# Altium schematic symbol library Ic%.SchLib: 452 symbols (part 7 of 12)
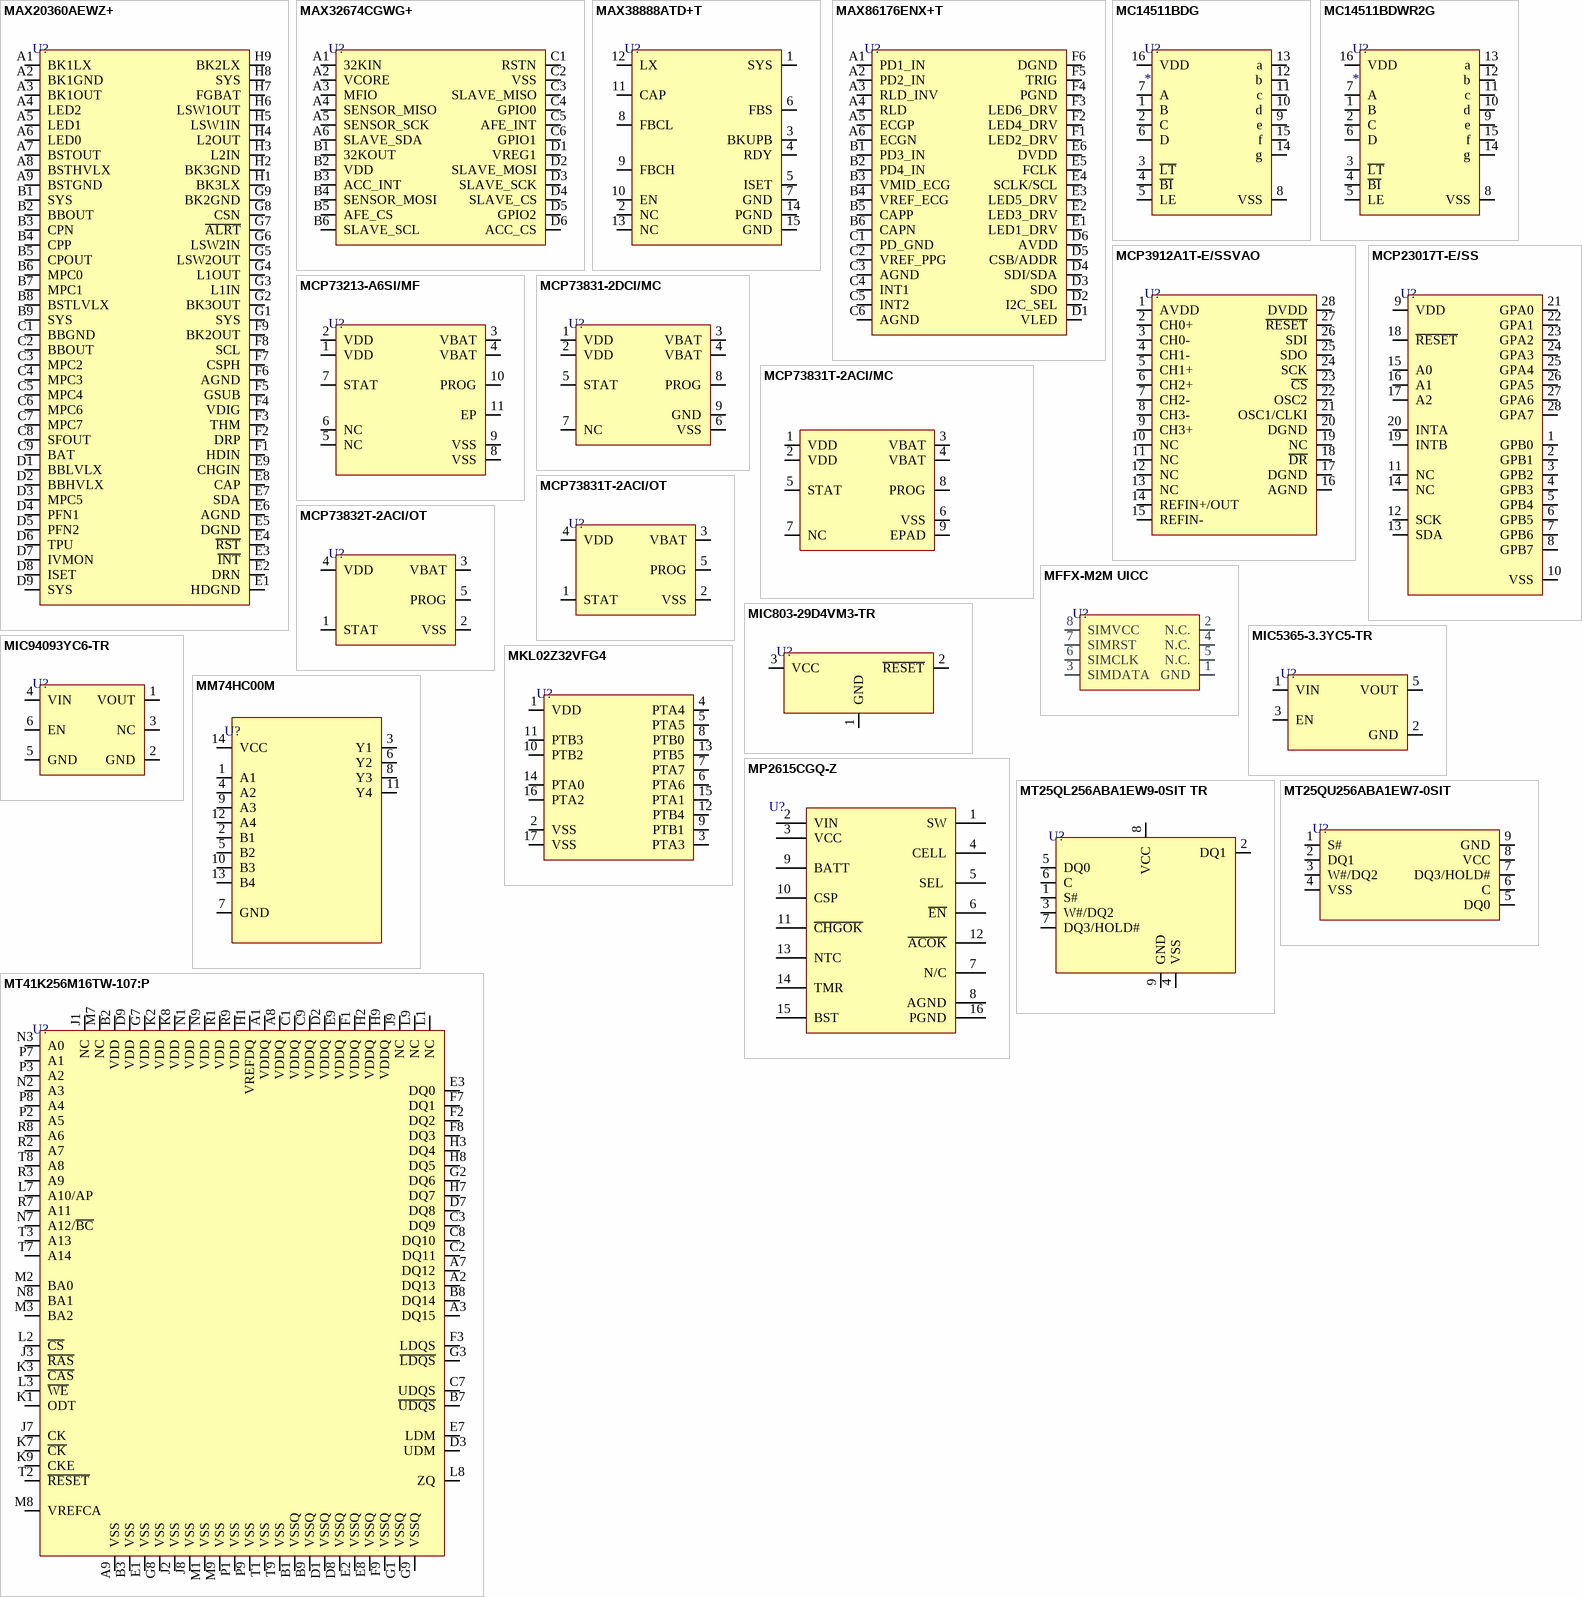
[diagram p29: symbols MAX20360AEWZ+ to MT41K256M16TW-107:P]

## MT25QU256ABA1EW7-0SIT
designator U?
IC FLASH 256MBIT SPI 8WPDFN; Manufacturer: Micron Technology; Manufacturer Part Number: MT25QU256ABA1EW7-0SIT; Supplier: Avnet; Supplier Part Number: 80AH7560; RoHS: Yes; Category: Flash; Stock: 1935; Pricing: 1=5.95, 10=5.43, 25=5.32, 50=5.28, 100=4.74 (USD); ComponentLink1URL: https://www.micron.com/~/media/documents/products/data-sheet/nor-flash/serial-nor/mt25q/die-rev-a/mt25q_qljs_u_256_aba_0.pdf?src-supplier=Digi-Key; ComponentLink1Description: https://www.micron.com/~/media/documents/products/data-sheet/nor-flash/serial-nor/mt25q/die-rev-a/mt25q_qljs_u_256_aba_0.pdf?src-supplier=Digi-Key; ComponentLink2URL: http://www.micron.com/-/media/documents/products/data%20sheet/nor%20flash/serial%20nor/mt25q/qlks_512mb_3v_45nm.pdf?src-supplier=Avnet; ComponentLink2Description: http://www.micron.com/-/media/documents/products/data%20sheet/nor%20flash/serial%20nor/mt25q/qlks_512mb_3v_45nm.pdf?src-supplier=Avnet; ComponentLink3URL: https://datasheet.octopart.com/MT25QU256ABA1EW7-0SIT-Micron-datasheet-149529383.pdf?src-supplier=SHENGYU+ELECTRONICS; ComponentLink3Description: https://datasheet.octopart.com/MT25QU256ABA1EW7-0SIT-Micron-datasheet-149529383.pdf?src-supplier=SHENGYU+ELECTRONICS; ComponentLink4URL: https://datasheet.octopart.com/MT25QU256ABA1EW7-0SIT-Micron-datasheet-138104096.pdf?src-supplier=LKR; ComponentLink4Description: https://datasheet.octopart.com/MT25QU256ABA1EW7-0SIT-Micron-datasheet-138104096.pdf?src-supplier=LKR; Item Type: IC
footprint 8-WPDFN (6x5)(MLP8)
pins: 1 S#, 2 DQ1, 3 W#/DQ2, 4 VSS, 5 DQ0, 6 C, 7 DQ3/HOLD#, 8 VCC, 9 GND

## MT41K256M16TW-107:P
designator U?
IC DRAM 4GBIT PAR 96FBGA; Manufacturer: Micron Technology; Manufacturer Part Number: MT41K256M16TW-107:P; Memory Format: Volatile,RAM,SDRAM; Frequency: 933MHz; Access Time: 20ns; Memory Size: 4Gb; Interface: Parallel; Address Bus Width: 15b; Operating Supply Voltage: 1.35V; Organization: 256M x 16; Supplier: Avnet; Supplier Part Number: MT41K256M16TW-107:P; RoHS: Yes; Category: RAM; Stock: 16187; Pricing: 1=4.93, 10=4.794, 30=4.658, 50=4.556, 100=4.42, 250=4.284, 500=4.148 (USD); Mounting Technology: Surface Mount; Case/Package: TFBGA; Pins: 96; Min Operating Temperature: 0°C; Max Operating Temperature: 95°C; Density: 4Gb; Clock Frequency: 933MHz; Series: -; Access Time-Max: 20ns; RoHS Compliant: Yes; ComponentLink1URL: http://www.farnell.com/datasheets/2712419.pdf?src-supplier=Farnell; ComponentLink1Description: http://www.farnell.com/datasheets/2712419.pdf?src-supplier=Farnell; ComponentLink2URL: https://www.micron.com/~/media/documents/products/data-sheet/dram/ddr3/4gb_ddr3l.pdf?src-supplier=Digi-Key; ComponentLink2Description: https://www.micron.com/~/media/documents/products/data-sheet/dram/ddr3/4gb_ddr3l.pdf?src-supplier=Digi-Key; ComponentLink3URL: https://www.micron.com/~/media/documents/products/data-sheet/dram/ddr3/4gb_ddr3l.pdf?src-supplier=Avnet; ComponentLink3Description: https://www.micron.com/~/media/documents/products/data-sheet/dram/ddr3/4gb_ddr3l.pdf?src-supplier=Avnet; ComponentLink4URL: http://www.farnell.com/datasheets/2712419.pdf?src-supplier=Newark; ComponentLink4Description: http://www.farnell.com/datasheets/2712419.pdf?src-supplier=Newark; LCSC Part Number: C253882; Item Type: IC
footprint 96-FBGA (8x14)
pins: A1 VDDQ, A2 DQ13, A3 DQ15, A7 DQ12, A8 VDDQ, A9 VSS, B1 VSSQ, B2 VDD, B3 VSS, B7 ~{UDQS}, B8 DQ14, B9 VSSQ, C1 VDDQ, C2 DQ11, C3 DQ9, C7 UDQS, C8 DQ10, C9 VDDQ, D1 VSSQ, D2 VDDQ, D3 UDM, D7 DQ8, D8 VSSQ, D9 VDD, E1 VSS, E2 VSSQ, E3 DQ0, E7 LDM, E8 VSSQ, E9 VDDQ, F1 VDDQ, F2 DQ2, F3 LDQS, F7 DQ1, F8 DQ3, F9 VSSQ, G1 VSSQ, G2 DQ6, G3 ~{LDQS}, G7 VDD, G8 VSS, G9 VSSQ, H1 VREFDQ, H2 VDDQ, H3 DQ4, H7 DQ7, H8 DQ5, H9 VDDQ, J1 NC, J2 VSS, J3 ~{RAS}, J7 CK, J8 VSS, J9 NC, K1 ODT, K2 VDD, K3 ~{CAS}, K7 ~{CK}, K8 VDD, K9 CKE, L1 NC, L2 ~{CS}, L3 ~{WE}, L7 A10/AP, L8 ZQ, L9 NC, M1 VSS, M2 BA0, M3 BA2, M7 NC, M8 VREFCA, M9 VSS, N1 VDD, N2 A3, N3 A0, N7 A12/~{BC}, N8 BA1, N9 VDD, P1 VSS, P2 A5, P3 A2, P7 A1, P8 A4, P9 VSS, R1 VDD, R2 A7, R3 A9, R7 A11, R8 A6, R9 VDD, T1 VSS, T2 ~{RESET}, T3 A13, T7 A14, T8 A8, T9 VSS

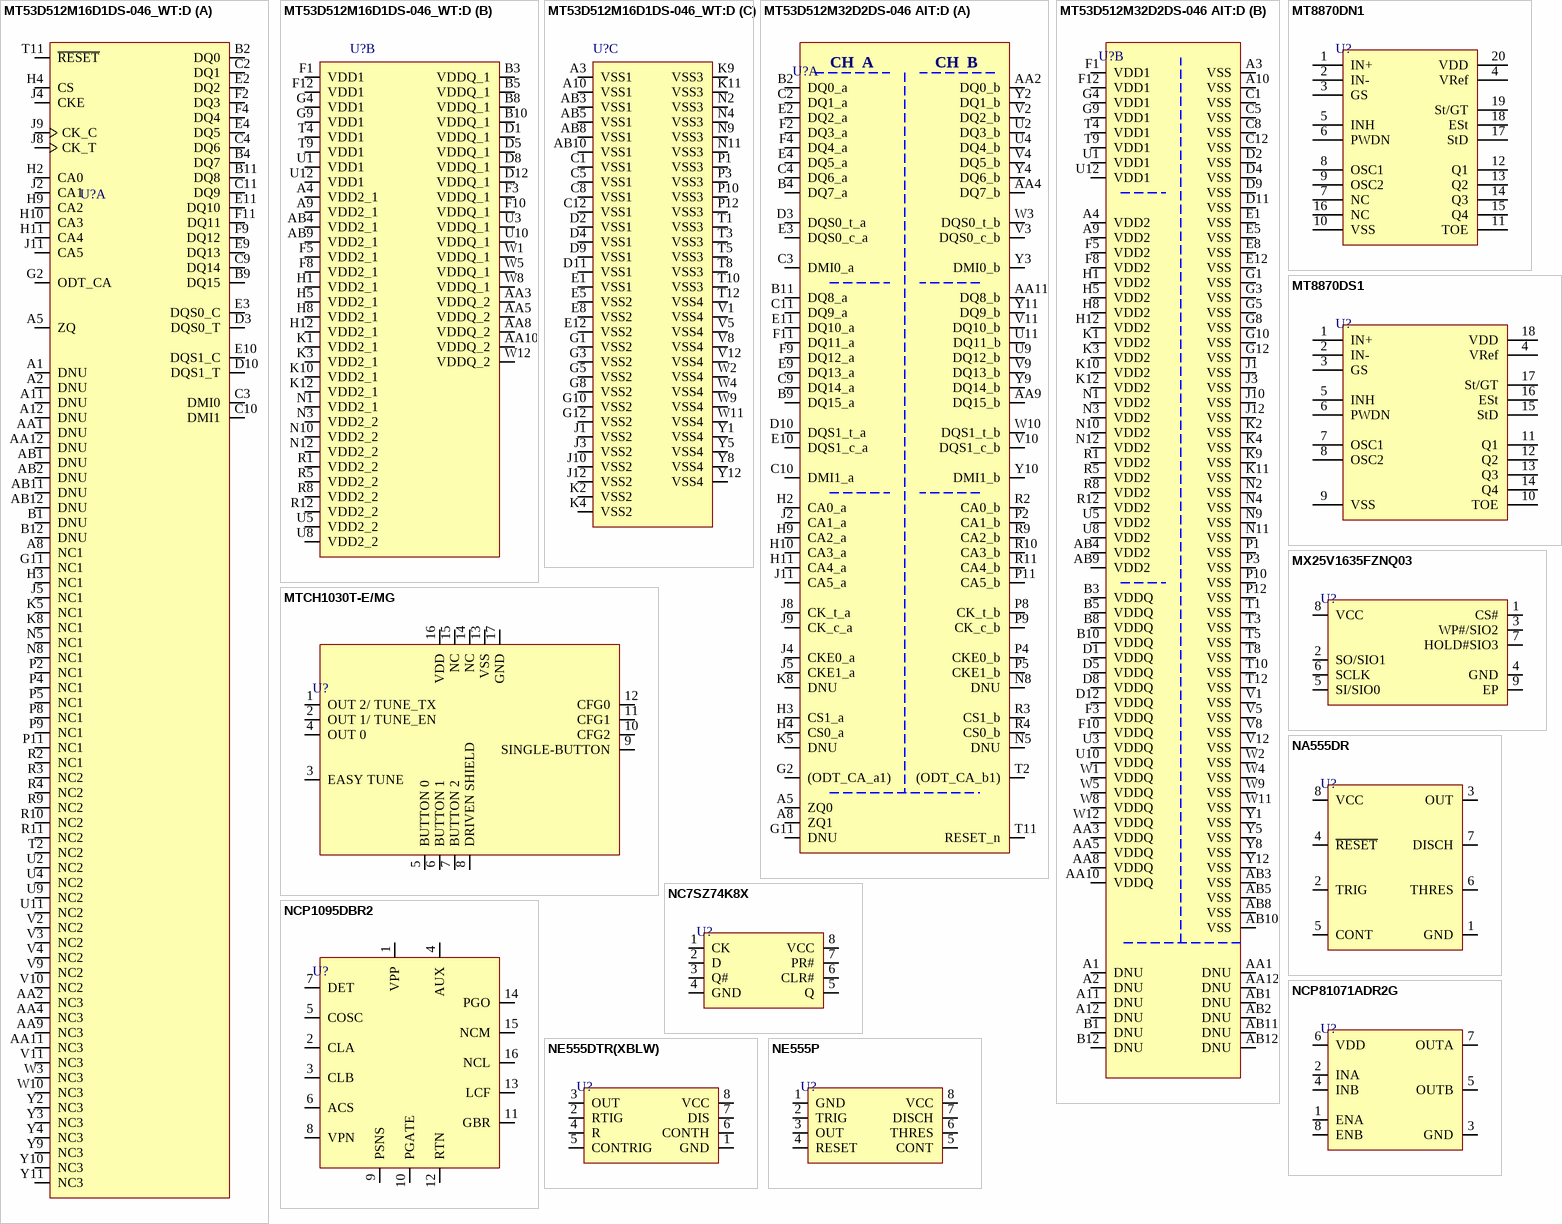
[diagram p12: symbols MT53D512M16D1DS-046_WT:D to NE555P]

## MT53D512M16D1DS-046_WT:D
designator U?
IC Dram 8GBIT 2.133GHZ 200WFBGA; Manufacturer: Micron Technology; Manufacturer Part Number: MT53D512M16D1DS-046 WT:D; Supplier: Avnet; Supplier Part Number: 80AH8240; RoHS: No; Category: Memory; Stock: 500; Pricing: 1=10.94, 10=10.13, 25=9.9, 50=9.85, 100=8.67 (USD); ComponentLink1URL: https://datasheet.octopart.com/MT53D512M16D1DS-046-WT%3AD-Micron-datasheet-165827613.pdf?src-supplier=Farnell; ComponentLink1Description: https://datasheet.octopart.com/MT53D512M16D1DS-046-WT%3AD-Micron-datasheet-165827613.pdf?src-supplier=Farnell; Item Type: IC
footprint 200-WFBGA (10x14.5)
part A pins: A1 DNU, A2 DNU, A5 ZQ, A8 NC1, A11 DNU, A12 DNU, AA1 DNU, AA2 NC3, AA4 NC3, AA9 NC3, AA11 NC3, AA12 DNU, AB1 DNU, AB2 DNU, AB11 DNU, AB12 DNU, B1 DNU, B2 DQ0, B4 DQ7, B9 DQ15, B11 DQ8, B12 DNU, C2 DQ1, C3 DMI0, C4 DQ6, C9 DQ14, C10 DMI1, C11 DQ9, D3 DQS0_T, D10 DQS1_T, E2 DQ2, E3 DQS0_C, E4 DQ5, E9 DQ13, E10 DQS1_C, E11 DQ10, F2 DQ3, F4 DQ4, F9 DQ12, F11 DQ11, G2 ODT_CA, G11 NC1, H2 CA0, H3 NC1, H4 CS, H9 CA2, H10 CA3, H11 CA4, J2 CA1, J4 CKE, J5 NC1, J8 CK_T, J9 CK_C, J11 CA5, K5 NC1, K8 NC1, N5 NC1, N8 NC1, P2 NC1, P4 NC1, P5 NC1, P8 NC1, P9 NC1, P11 NC1, R2 NC1, R3 NC2, R4 NC2, R9 NC2, R10 NC2, R11 NC2, T2 NC2, T11 ~{RESET}, U2 NC2, U4 NC2, U9 NC2, U11 NC2, V2 NC2, V3 NC2, V4 NC2, V9 NC2, V10 NC2, V11 NC3, W3 NC3, W10 NC3, Y2 NC3, Y3 NC3, Y4 NC3, Y9 NC3, Y10 NC3, Y11 NC3
part B pins: A4 VDD2_1 (power), A9 VDD2_1 (power), AA3 VDDQ_2 (power), AA5 VDDQ_2 (power), AA8 VDDQ_2 (power), AA10 VDDQ_2 (power), AB4 VDD2_1 (power), AB9 VDD2_1 (power), B3 VDDQ_1 (power), B5 VDDQ_1 (power), B8 VDDQ_1 (power), B10 VDDQ_1 (power), D1 VDDQ_1 (power), D5 VDDQ_1 (power), D8 VDDQ_1 (power), D12 VDDQ_1 (power), F1 VDD1 (power), F3 VDDQ_1 (power), F5 VDD2_1 (power), F8 VDD2_1 (power), F10 VDDQ_1 (power), F12 VDD1 (power), G4 VDD1 (power), G9 VDD1 (power), H1 VDD2_1 (power), H5 VDD2_1 (power), H8 VDD2_1 (power), H12 VDD2_1 (power), K1 VDD2_1 (power), K3 VDD2_1 (power), K10 VDD2_1 (power), K12 VDD2_1 (power), N1 VDD2_1 (power), N3 VDD2_2 (power), N10 VDD2_2 (power), N12 VDD2_2 (power), R1 VDD2_2 (power), R5 VDD2_2 (power), R8 VDD2_2 (power), R12 VDD2_2 (power), T4 VDD1 (power), T9 VDD1 (power), U1 VDD1 (power), U3 VDDQ_1 (power), U5 VDD2_2 (power), U8 VDD2_2 (power), U10 VDDQ_1 (power), U12 VDD1 (power), W1 VDDQ_1 (power), W5 VDDQ_1 (power), W8 VDDQ_1 (power), W12 VDDQ_2 (power)
part C pins: A3 VSS1 (power), A10 VSS1 (power), AB3 VSS1 (power), AB5 VSS1 (power), AB8 VSS1 (power), AB10 VSS1 (power), C1 VSS1 (power), C5 VSS1 (power), C8 VSS1 (power), C12 VSS1 (power), D2 VSS1 (power), D4 VSS1 (power), D9 VSS1 (power), D11 VSS1 (power), E1 VSS1 (power), E5 VSS2 (power), E8 VSS2 (power), E12 VSS2 (power), G1 VSS2 (power), G3 VSS2 (power), G5 VSS2 (power), G8 VSS2 (power), G10 VSS2 (power), G12 VSS2 (power), J1 VSS2 (power), J3 VSS2 (power), J10 VSS2 (power), J12 VSS2 (power), K2 VSS2 (power), K4 VSS2 (power), K9 VSS3 (power), K11 VSS3 (power), N2 VSS3 (power), N4 VSS3 (power), N9 VSS3 (power), N11 VSS3 (power), P1 VSS3 (power), P3 VSS3 (power), P10 VSS3 (power), P12 VSS3 (power), T1 VSS3 (power), T3 VSS3 (power), T5 VSS3 (power), T8 VSS3 (power), T10 VSS3 (power), T12 VSS4 (power), V1 VSS4 (power), V5 VSS4 (power), V8 VSS4 (power), V12 VSS4 (power), W2 VSS4 (power), W4 VSS4 (power), W9 VSS4 (power), W11 VSS4 (power), Y1 VSS4 (power), Y5 VSS4 (power), Y8 VSS4 (power), Y12 VSS4 (power)

## MT53D512M32D2DS-046 AIT:D
designator U?
IC Dram 16GBIT 2133MHZ 200WFBGA; Manufacturer: Micron Technology; Manufacturer Part Number: MT53D512M32D2DS-046 AIT:D; Item Type: Memory IC; Memory Format: Volatile; Memory Size: 16Gb; Frequency: 2.133GHz; Supplier: Digikey; Supplier Part Number: MT53D512M32D2DS-046AIT:D-ND; RoHS: No; Stock: 428; Pricing: 1=20.55, 10=19.14, 25=18.9348, 40=18.46775, 80=16.212, 230=15.66509 (USD); Mounting Technology: Surface Mount; Pins: 200; Min Operating Temperature: -40°C; Max Operating Temperature: 85°C; Series: -; Packaging: Tray
footprint 200-WFBGA (10x14.5)
part A pins: A5 ZQ0, A8 ZQ1, AA2 DQ0_b, AA4 DQ7_b, AA9 DQ15_b, AA11 DQ8_b, B2 DQ0_a, B4 DQ7_a, B9 DQ15_a, B11 DQ8_a, C2 DQ1_a, C3 DMI0_a, C4 DQ6_a, C9 DQ14_a, C10 DMI1_a, C11 DQ9_a, D3 DQS0_t_a, D10 DQS1_t_a, E2 DQ2_a, E3 DQS0_c_a, E4 DQ5_a, E9 DQ13_a, E10 DQS1_c_a, E11 DQ10_a, F2 DQ3_a, F4 DQ4_a, F9 DQ12_a, F11 DQ11_a, G2 (ODT_CA_a1), G11 DNU, H2 CA0_a, H3 CS1_a, H4 CS0_a, H9 CA2_a, H10 CA3_a, H11 CA4_a, J2 CA1_a, J4 CKE0_a, J5 CKE1_a, J8 CK_t_a, J9 CK_c_a, J11 CA5_a, K5 DNU, K8 DNU, N5 DNU, N8 DNU, P2 CA1_b, P4 CKE0_b, P5 CKE1_b, P8 CK_t_b, P9 CK_c_b, P11 CA5_b, R2 CA0_b, R3 CS1_b, R4 CS0_b, R9 CA2_b, R10 CA3_b, R11 CA4_b, T2 (ODT_CA_b1), T11 RESET_n, U2 DQ3_b, U4 DQ4_b, U9 DQ12_b, U11 DQ11_b, V2 DQ2_b, V3 DQS0_c_b, V4 DQ5_b, V9 DQ13_b, V10 DQS1_c_b, V11 DQ10_b, W3 DQS0_t_b, W10 DQS1_t_b, Y2 DQ1_b, Y3 DMI0_b, Y4 DQ6_b, Y9 DQ14_b, Y10 DMI1_b, Y11 DQ9_b
part B pins: A1 DNU, A2 DNU, A3 VSS, A4 VDD2, A9 VDD2, A10 VSS, A11 DNU, A12 DNU, AA1 DNU, AA3 VDDQ, AA5 VDDQ, AA8 VDDQ, AA10 VDDQ, AA12 DNU, AB1 DNU, AB2 DNU, AB3 VSS, AB4 VDD2, AB5 VSS, AB8 VSS, AB9 VDD2, AB10 VSS, AB11 DNU, AB12 DNU, B1 DNU, B3 VDDQ, B5 VDDQ, B8 VDDQ, B10 VDDQ, B12 DNU, C1 VSS, C5 VSS, C8 VSS, C12 VSS, D1 VDDQ, D2 VSS, D4 VSS, D5 VDDQ, D8 VDDQ, D9 VSS, D11 VSS, D12 VDDQ, E1 VSS, E5 VSS, E8 VSS, E12 VSS, F1 VDD1, F3 VDDQ, F5 VDD2, F8 VDD2, F10 VDDQ, F12 VDD1, G1 VSS, G3 VSS, G4 VDD1, G5 VSS, G8 VSS, G9 VDD1, G10 VSS, G12 VSS, H1 VDD2, H5 VDD2, H8 VDD2, H12 VDD2, J1 VSS, J3 VSS, J10 VSS, J12 VSS, K1 VDD2, K2 VSS, K3 VDD2, K4 VSS, K9 VSS, K10 VDD2, K11 VSS, K12 VDD2, N1 VDD2, N2 VSS, N3 VDD2, N4 VSS, N9 VSS, N10 VDD2, N11 VSS, N12 VDD2, P1 VSS, P3 VSS, P10 VSS, P12 VSS, R1 VDD2, R5 VDD2, R8 VDD2, R12 VDD2, T1 VSS, T3 VSS, T4 VDD1, T5 VSS, T8 VSS, T9 VDD1, T10 VSS, T12 VSS, U1 VDD1, U3 VDDQ, U5 VDD2, U8 VDD2, U10 VDDQ, U12 VDD1, V1 VSS, V5 VSS, V8 VSS, V12 VSS, W1 VDDQ, W2 VSS, W4 VSS, W5 VDDQ, W8 VDDQ, W9 VSS, W11 VSS, W12 VDDQ, Y1 VSS, Y5 VSS, Y8 VSS, Y12 VSS
part A text: CH  A; CH  B

## MT8870DN1
designator U?
IC TELECOM INTERFACE 20SSOP; Manufacturer: Microsemi; Manufacturer Part Number: MT8870DN1; Logic Function: Receiver; Number of Circuits: 1; Operating Supply Current: 3mA; Frequency: 3.58MHz; Operating Supply Voltage: 5V; Min Supply Voltage: 4.75V; Max Supply Voltage: 5.25V; Max Power Dissipation: 500mW; Supplier 1: Newark; RoHS: No; Category: Uncategorized; Mounting Technology: Surface Mount; Case/Package: SSOP; Pins: 20; Weight: 0.016oz; Min Operating Temperature: -40°C; Max Operating Temperature: 85°C; Packaging: Rail/Tube; Package Quantity: 660; Radiation Hardening: No; RoHS Compliant: No; ComponentLink1URL: https://datasheet.ciiva.com/29641/mt8870d-datasheet-oct2006-29641321.pdf?src-supplier=Digi-Key; ComponentLink1Description: https://datasheet.ciiva.com/29641/mt8870d-datasheet-oct2006-29641321.pdf?src-supplier=Digi-Key; Supplier Part Number 1: 03AH2719; LCSC Part Number: C1522106; Item Type: IC
footprint SSOP-20-208mil
pins: 1 IN+, 2 IN-, 3 GS, 4 VRef, 5 INH, 6 PWDN, 7 NC, 8 OSC1, 9 OSC2, 10 VSS, 11 TOE, 12 Q1, 13 Q2, 14 Q3, 15 Q4, 16 NC, 17 StD, 18 ESt, 19 St/GT, 20 VDD

## MT8870DS1
designator U?
IC TELECOM INTERFACE 18SOIC; Manufacturer: Microchip; Manufacturer Part Number: MT8870DS1; Supplier 1: Arrow Electronics; RoHS: Yes; Category: Interface ICs; Stock 1: 3900; Pricing 1: 1=4.2424, 10=3.8974, 25=3.5777, 50=3.381, 100=3.2039, 500=3.0498 (USD); ComponentLink1URL: http://www.microsemi.com/document-portal/doc_download/127041-mt8870d-datasheet-oct2006?src-supplier=Digi-Key; ComponentLink1Description: http://www.microsemi.com/document-portal/doc_download/127041-mt8870d-datasheet-oct2006?src-supplier=Digi-Key; Supplier Part Number 1: MT8870DS1; LCSC Part Number: C1522188; Item Type: IC
footprint SOIC-18
pins: 1 IN+, 2 IN-, 3 GS, 4 VRef, 5 INH, 6 PWDN, 7 OSC1, 8 OSC2, 9 VSS, 10 TOE, 11 Q1, 12 Q2, 13 Q3, 14 Q4, 15 StD, 16 ESt, 17 St/GT, 18 VDD

## MTCH1030T-E/MG
designator U?
3 CHANNEL TOUCH CONTROLLER, GPIO; Manufacturer: Microchip; Manufacturer Part Number: MTCH1030T-E/MG; Item Type: IC; Supplier: Digi-Key; Supplier Part Number: 150-MTCH1030T-E/MGCT-ND; RoHS: No; Stock: 3300; Pricing: 1=1, 25=0.92, 100=0.83 (USD)
footprint 16-QFN (3x3).
pins: 1 OUT 2/ TUNE_TX, 2 OUT 1/ TUNE_EN, 3 EASY TUNE, 4 OUT 0, 5 BUTTON 0, 6 BUTTON 1, 7 BUTTON 2, 8 DRIVEN SHIELD, 9 SINGLE-BUTTON, 10 CFG2, 11 CFG1, 12 CFG0, 13 VSS, 14 NC, 15 NC, 16 VDD, 17 GND

## MX25V1635FZNQ03
designator U?
IC FLASH 16MBIT SPI/QUAD 8WSON; Manufacturer: Macronix; Manufacturer Part Number: MX25V1635FZNQ03; Supplier: Digikey; Supplier Part Number: 1092-MX25V1635FZNQ03-ND; RoHS: No; Category: Flash; Stock: 7952; Pricing: 1=1.12, 10=1.017, 25=0.99, 40=0.98475, 80=0.88038, 230=0.87778, 570=0.86453, 1140=0.82783, 5130=0.77074 (USD); Item Type: IC
footprint 8-WSON 6x5-mm
pins: 1 CS#, 2 SO/SIO1, 3 WP#/SIO2, 4 GND, 5 SI/SIO0, 6 SCLK, 7 HOLD#SIO3, 8 VCC, 9 EP

## NA555DR
designator U?
IC OSC SGL TIMER 100KHZ 8-SOIC; Manufacturer: Texas Instruments; Manufacturer Part Number: NA555DR; Supplier: Mouser; LCSC Part Number: C128415; RoHS: Yes; Item Type: IC; Stock: 11620; Pricing: 1=0.41, 10=0.303, 50=0.303, 100=0.172, 1000=0.123, 10000=0.104 (USD); Thickness: 1.58mm; Lead Free: 5697LeadFree; ComponentLink1URL: https://datasheet.ciiva.com/22713/1737034-22713893.pdf?src-supplier=Element14; ComponentLink1Description: https://datasheet.ciiva.com/22713/1737034-22713893.pdf?src-supplier=Element14; ComponentLink2URL: https://datasheet.ciiva.com/46384/1874740-46384605.pdf?src-supplier=Element14; ComponentLink2Description: https://datasheet.ciiva.com/46384/1874740-46384605.pdf?src-supplier=Element14; ComponentLink3URL: https://datasheet.ciiva.com/1233/sa555-1233083.pdf?src-supplier=Digikey; ComponentLink3Description: https://datasheet.ciiva.com/1233/sa555-1233083.pdf?src-supplier=Digikey; ComponentLink4URL: https://datasheet.ciiva.com/1233/sa555-1233129.pdf?src-supplier=Digikey; ComponentLink4Description: https://datasheet.ciiva.com/1233/sa555-1233129.pdf?src-supplier=Digikey; ComponentLink5URL: https://datasheet.ciiva.com/1233/sa555-1233130.pdf?src-supplier=Digikey; ComponentLink5Description: https://datasheet.ciiva.com/1233/sa555-1233130.pdf?src-supplier=Digikey; ComponentLink6URL: https://datasheet.ciiva.com/14274/se555m-14274506.pdf?src-supplier=Avnet; ComponentLink6Description: https://datasheet.ciiva.com/14274/se555m-14274506.pdf?src-supplier=Avnet
footprint SOIC-8(0.154", 3.90mm Width)
pins: 1 GND, 2 TRIG, 3 OUT, 4 ~{RESET}, 5 CONT, 6 THRES, 7 DISCH, 8 VCC

## NC7SZ74K8X
designator U?
IC FF D-TYPE SNGL 1BIT US8; Manufacturer: ON Semiconductor / Fairchild; Manufacturer Part Number: NC7SZ74K8X; Number of Channels: 1NUMBER; Number of Outputs: 2NUMBER; Supplier: Digikey; LCSC Part Number: C128370; RoHS: Yes; Item Type: IC; Stock: 98; Pricing: 1=0.71, 10=0.427, 25=0.352, 100=0.2668, 250=0.22504, 500=0.1993, 1000=0.17774 (USD); Number of Inputs: 1NUMBER; Lead Free: 5697LeadFree; ComponentLink1URL: https://datasheet.ciiva.com/34301/1022228-34301883.pdf?src-supplier=Jameco; ComponentLink1Description: https://datasheet.ciiva.com/34301/1022228-34301883.pdf?src-supplier=Jameco; ComponentLink2URL: https://datasheet.ciiva.com/15091/getdatasheetpartid-93111-15091349.pdf?src-supplier=Verical; ComponentLink2Description: https://datasheet.ciiva.com/15091/getdatasheetpartid-93111-15091349.pdf?src-supplier=Verical; ComponentLink3URL: https://datasheet.ciiva.com/5701/1727525-5701664.pdf?src-supplier=Farnell; ComponentLink3Description: https://datasheet.ciiva.com/5701/1727525-5701664.pdf?src-supplier=Farnell; ComponentLink4URL: https://datasheet.ciiva.com/8250/nc7sz74-8250464.pdf?src-supplier=Avnet; ComponentLink4Description: https://datasheet.ciiva.com/8250/nc7sz74-8250464.pdf?src-supplier=Avnet; ComponentLink5URL: https://datasheet.ciiva.com/4812/nc7sz74-116462-4812418.pdf?src-supplier=Mouser; ComponentLink5Description: https://datasheet.ciiva.com/4812/nc7sz74-116462-4812418.pdf?src-supplier=Mouser; ComponentLink6URL: https://datasheet.ciiva.com/1856/nc7sz74-1856933.pdf?src-supplier=Digikey; ComponentLink6Description: https://datasheet.ciiva.com/1856/nc7sz74-1856933.pdf?src-supplier=Digikey; ComponentLink7URL: https://datasheet.ciiva.com/1856/nc7sz74-1856934.pdf?src-supplier=Digikey; ComponentLink7Description: https://datasheet.ciiva.com/1856/nc7sz74-1856934.pdf?src-supplier=Digikey; ComponentLink8URL: https://datasheet.ciiva.com/1856/nc7sz74-1856935.pdf?src-supplier=Digikey; ComponentLink8Description: https://datasheet.ciiva.com/1856/nc7sz74-1856935.pdf?src-supplier=Digikey; ComponentLink9URL: https://datasheet.ciiva.com/28416/1727525-28416494.pdf?src-supplier=Element14; ComponentLink9Description: https://datasheet.ciiva.com/28416/1727525-28416494.pdf?src-supplier=Element14; ComponentLink10URL: https://datasheet.ciiva.com/7970/1727525-7970733.pdf?src-supplier=Element14; ComponentLink10Description: https://datasheet.ciiva.com/7970/1727525-7970733.pdf?src-supplier=Element14; ComponentLink11URL: https://datasheet.ciiva.com/7970/1727525-7970734.pdf?src-supplier=Element14; ComponentLink11Description: https://datasheet.ciiva.com/7970/1727525-7970734.pdf?src-supplier=Element14; ComponentLink12URL: https://datasheet.ciiva.com/7970/1727525-7970735.pdf?src-supplier=Element14; ComponentLink12Description: https://datasheet.ciiva.com/7970/1727525-7970735.pdf?src-supplier=Element14; ComponentLink13URL: https://datasheet.ciiva.com/16740/nc7sz74-16740983.pdf?src-supplier=Future+Electronics; ComponentLink13Description: https://datasheet.ciiva.com/16740/nc7sz74-16740983.pdf?src-supplier=Future+Electronics; ComponentLink14URL: https://datasheet.ciiva.com/48704/001253503-da-01-en-ic-d-type-pos-trg-nc7sz74k8x-vfsop-8-fsc-48704778.pdf?src-supplier=Conrad; ComponentLink14Description: https://datasheet.ciiva.com/48704/001253503-da-01-en-ic-d-type-pos-trg-nc7sz74k8x-vfsop-8-fsc-48704778.pdf?src-supplier=Conrad
footprint VFSOP-8-2.3mm
pins: 1 CK, 2 D, 3 Q#, 4 GND, 5 Q, 6 CLR#, 7 PR#, 8 VCC

## NCP1095DBR2
designator U?
IC POE CNTRL 1 CHANNEL 16TSSOP; Manufacturer: ON Semiconductor; Manufacturer Part Number: NCP1095DBR2; Supplier: Digikey; LCSC Part Number: C904377; RoHS: Yes; Item Type: IC; Stock: 19; Pricing: 1=2.7, 10=1.71, 25=1.462, 100=1.1886, 250=1.05764, 500=0.97836, 1000=0.91278 (USD)
footprint TSSOP_16
pins: 1 VPP, 2 CLA, 3 CLB, 4 AUX, 5 COSC, 6 ACS, 7 DET, 8 VPN, 9 PSNS, 10 PGATE, 11 GBR, 12 RTN, 13 LCF, 14 PGO, 15 NCM, 16 NCL

## NCP81071ADR2G
designator U?
IC GATE DRVR LOW-SIDE 8SOIC; Manufacturer: ON Semiconductor; Manufacturer Part Number: NCP81071ADR2G; Number of Outputs: 2; Max Supply Voltage: 20V; Min Supply Voltage: 4.5V; Max Output Current: 5A; Channel Type: Independent; Max Supply Current: 3mA; Supplier 1: Digi-Key; RoHS: Yes; Item Type: IC; Pricing 1: 1=1.40000, 10=1.25100, 25=1.18720, 100=0.97520, 250=0.91160, 500=0.80560, 1000=0.70000 (USD); Mount: Surface Mount; Case/Package: SOIC; Number of Pins: 8; Min Operating Temperature: -40°C; Max Operating Temperature: 140°C; Packaging: Cut Tape; Number of Drivers: 2; Length: 5mm; Width: 4mm; Height: 1.5mm; REACH SVHC: No SVHC; Lead Free: Lead Free; RoHS Compliant: Yes; ComponentLink1URL: https://datasheet.ciiva.com/48511/ncp81071-d-48511319.pdf?src-supplier=Avnet; ComponentLink1Description: https://datasheet.ciiva.com/48511/ncp81071-d-48511319.pdf?src-supplier=Avnet; Supplier Part Number 1: NCP81071ADR2GOSDKR-ND
footprint SOIC-8
pins: 1 ENA, 2 INA, 3 GND, 4 INB, 5 OUTB, 6 VDD, 7 OUTA, 8 ENB

## NE555DTR(XBLW)
designator U?
NO SOP-8 Timers ROHS; Manufacturer: XBLW; Manufacturer Part Number: NE555DTR(XBLW); Item Type: IC; Package: SOP-8; LCSC Part Number: C18723595; ComponentLink1Description: LCSC; ComponentLink1URL: https://www.lcsc.com/product-detail/Timers_span-style-background-color-ff0-XBLW-span-NE555DTR-XBLW_C18723595.html
footprint SOP-8
pins: 1 GND, 2 RTIG, 3 OUT, 4 R, 5 CONTRIG, 6 CONTH, 7 DIS, 8 VCC

## NE555P
designator U?
100kHz DIP-8 Timers / Counters ROHS; Manufacturer: TI; Manufacturer Part Number: NE555P; Item Type: IC; Package: Custom; LCSC Part Number: C46749
footprint 8-PDIP
pins: 1 GND, 2 TRIG, 3 OUT, 4 RESET, 5 CONT, 6 THRES, 7 DISCH, 8 VCC

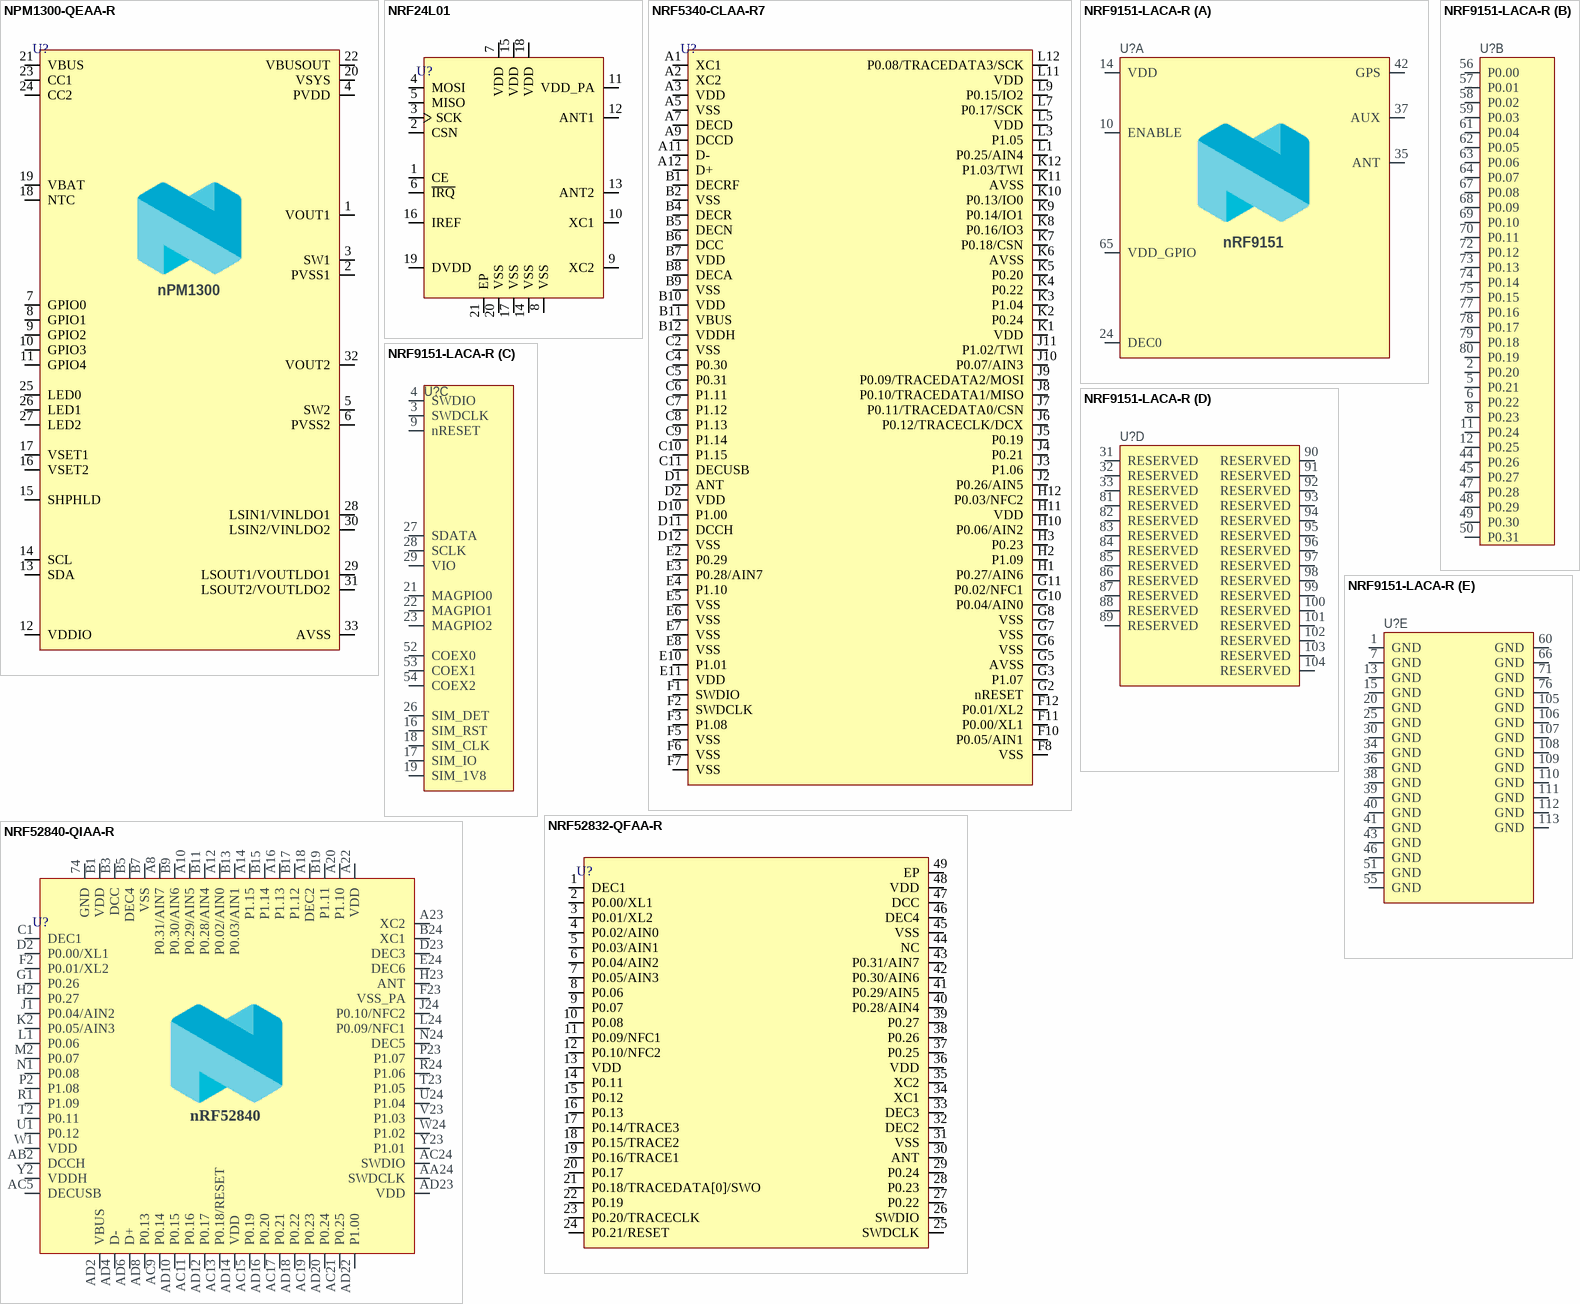
[diagram p13: symbols NPM1300-QEAA-R to NRF52840-QIAA-R]

## NPM1300-QEAA-R
designator U?
PMIC (POWER MANAGEMENT IC) WITH; Manufacturer: Nordic Semiconductor; Manufacturer Part Number: NPM1300-QEAA-R; Supplier: Digikey; Supplier Part Number: 4823-NPM1300-QEAA-RCT-ND; RoHS: No; Item Type: IC; Stock: 2826; Pricing: 1=4.13, 100=3.23, 500=2.55, 1000=2.22001 (USD)
footprint 32-QFN (5x5)
pins: 1 VOUT1, 2 PVSS1, 3 SW1, 4 PVDD, 5 SW2, 6 PVSS2, 7 GPIO0, 8 GPIO1, 9 GPIO2, 10 GPIO3, 11 GPIO4, 12 VDDIO, 13 SDA, 14 SCL, 15 SHPHLD, 16 VSET2, 17 VSET1, 18 NTC, 19 VBAT, 20 VSYS, 21 VBUS, 22 VBUSOUT, 23 CC1, 24 CC2, 25 LED0, 26 LED1, 27 LED2, 28 LSIN1/VINLDO1, 29 LSOUT1/VOUTLDO1, 30 LSIN2/VINLDO2, 31 LSOUT2/VOUTLDO2, 32 VOUT2, 33 AVSS
text: nPM1300

## NRF24L01
designator U?
IC RF TXRX ISM>1GHZ 20VFQFN; Manufacturer: Nordic Semiconductor; Manufacturer Part Number: NRF24L01; Frequency: 2.4GHz; Data Rate: 2Mbps; Interface: SPI; Current - Receiving: 12.3mA; Current - Transmitting: 11.3mA; Output Power (dBm): 0dBm; Max Supply Voltage: 3.6V; Sensitivity: -85dBm; Supplier: Digikey; Supplier Part Number: NRF24L01-ND; RoHS: Yes; Category: RF Receivers, Transceivers; Pricing: 2450=2.09555 (USD); Case/Package: QFN; Pins: 20; Min Operating Temperature: -40°C; Max Operating Temperature: 85°C; Packaging: Tray; Series: -; Package Quantity: 490; Length: 4mm; Depth: 4mm; Radiation Hardening: No; RoHS Compliant: Yes; ComponentLink1URL: https://datasheet.ciiva.com/29856/nrf24l01-product-specification-v2-0-29856478.pdf?src-supplier=Digikey; ComponentLink1Description: https://datasheet.ciiva.com/29856/nrf24l01-product-specification-v2-0-29856478.pdf?src-supplier=Digikey; ComponentLink2URL: https://datasheet.ciiva.com/14099/nordic-nrf24l01p-tds-14099244.pdf?src-supplier=Distrelec; ComponentLink2Description: https://datasheet.ciiva.com/14099/nordic-nrf24l01p-tds-14099244.pdf?src-supplier=Distrelec; ComponentLink3URL: https://datasheet.ciiva.com/26842/getdatasheetpartid-371586-26842486.pdf?src-supplier=Verical; ComponentLink3Description: https://datasheet.ciiva.com/26842/getdatasheetpartid-371586-26842486.pdf?src-supplier=Verical; Item Type: IC
footprint 20-QFN (4x4) EP Via
pins: 1 CE, 2 CSN, 3 SCK, 4 MOSI, 5 MISO, 6 ~{IRQ}, 7 VDD, 8 VSS, 9 XC2, 10 XC1, 11 VDD_PA, 12 ANT1, 13 ANT2, 14 VSS, 15 VDD, 16 IREF, 17 VSS, 18 VDD, 19 DVDD, 20 VSS, 21 EP

## NRF5340-CLAA-R7
designator U?
IC RF TXRX+MCU 802.15.4 95WLCSP; Manufacturer: Nordic Semiconductor; Manufacturer Part Number: NRF5340-CLAA-R7; Supplier: Digikey; LCSC Part Number: C3606790; RoHS: No; Item Type: IC; Stock: 2282; Pricing: 1=7.28, 100=6.2, 500=5.39004 (USD)
footprint 95-WLCSP (4.39x3.85)
pins: A1 XC1, A2 XC2, A3 VDD, A5 VSS, A7 DECD, A9 DCCD, A11 D-, A12 D+, B1 DECRF, B2 VSS, B4 DECR, B5 DECN, B6 DCC, B7 VDD, B8 DECA, B9 VSS, B10 VDD, B11 VBUS, B12 VDDH, C2 VSS, C4 P0.30, C5 P0.31, C6 P1.11, C7 P1.12, C8 P1.13, C9 P1.14, C10 P1.15, C11 DECUSB, D1 ANT, D2 VDD, D10 P1.00, D11 DCCH, D12 VSS, E2 P0.29, E3 P0.28/AIN7, E4 P1.10, E5 VSS, E6 VSS, E7 VSS, E8 VSS, E10 P1.01, E11 VDD, F1 SWDIO, F2 SWDCLK, F3 P1.08, F5 VSS, F6 VSS, F7 VSS, F8 VSS, F10 P0.05/AIN1, F11 P0.00/XL1, F12 P0.01/XL2, G2 nRESET, G3 P1.07, G5 AVSS, G6 VSS, G7 VSS, G8 VSS, G10 P0.04/AIN0, G11 P0.02/NFC1, H1 P0.27/AIN6, H2 P1.09, H3 P0.23, H10 P0.06/AIN2, H11 VDD, H12 P0.03/NFC2, J2 P0.26/AIN5, J3 P1.06, J4 P0.21, J5 P0.19, J6 P0.12/TRACECLK/DCX, J7 P0.11/TRACEDATA0/CSN, J8 P0.10/TRACEDATA1/MISO, J9 P0.09/TRACEDATA2/MOSI, J10 P0.07/AIN3, J11 P1.02/TWI, K1 VDD, K2 P0.24, K3 P1.04, K4 P0.22, K5 P0.20, K6 AVSS, K7 P0.18/CSN, K8 P0.16/IO3, K9 P0.14/IO1, K10 P0.13/IO0, K11 AVSS, K12 P1.03/TWI, L1 P0.25/AIN4, L3 P1.05, L5 VDD, L7 P0.17/SCK, L9 P0.15/IO2, L11 VDD, L12 P0.08/TRACEDATA3/SCK

## NRF9151-LACA-R
designator U?
IC RF TXRX + MCU CELL; Part Number: nRF9151-LACAA0A; Manufacturer: Nordic Semiconductor; Manufacturer Part Number: NRF9151-LACA-R; Component Status: Active; Pad Count: 113; Value: nRF9151-LACAA0A; Note: N.A.; Component Class: Nordic_Devices; Author: kod1; ComponentLink1URL: N.A.; ComponentLink1Description: Datasheet; ComponentLink2URL: N.A.; ComponentLink2Description: Supplier link; HelpURL: N.A.; LatestRevisionDate: 2024-04-29; Published: 2024-04-29; Footprint Doc: LGA-113; Supplier 1: Nordic Semiconductor; Supplier Part Number 1: nRF9151-LACAA0A; Supplier 2: N.A.; Supplier Part Number 2: N.A.; Artikkelnr Noca: N.A.; Part number IPS: N.A.; Part number Norautron: N.A.
footprint NRF9151-LACA-R
part A pins: 10 ENABLE, 14 VDD, 24 DEC0, 35 ANT, 37 AUX, 42 GPS, 65 VDD_GPIO
part B pins: 2 P0.20, 5 P0.21, 6 P0.22, 8 P0.23, 11 P0.24, 12 P0.25, 44 P0.26, 45 P0.27, 47 P0.28, 48 P0.29, 49 P0.30, 50 P0.31, 56 P0.00, 57 P0.01, 58 P0.02, 59 P0.03, 61 P0.04, 62 P0.05, 63 P0.06, 64 P0.07, 67 P0.08, 68 P0.09, 69 P0.10, 70 P0.11, 72 P0.12, 73 P0.13, 74 P0.14, 75 P0.15, 77 P0.16, 78 P0.17, 79 P0.18, 80 P0.19
part C pins: 3 SWDCLK, 4 SWDIO, 9 nRESET, 16 SIM_RST, 17 SIM_IO, 18 SIM_CLK, 19 SIM_1V8, 21 MAGPIO0, 22 MAGPIO1, 23 MAGPIO2, 26 SIM_DET, 27 SDATA, 28 SCLK, 29 VIO, 52 COEX0, 53 COEX1, 54 COEX2
part D pins: 31 RESERVED, 32 RESERVED, 33 RESERVED, 81 RESERVED, 82 RESERVED, 83 RESERVED, 84 RESERVED, 85 RESERVED, 86 RESERVED, 87 RESERVED, 88 RESERVED, 89 RESERVED, 90 RESERVED, 91 RESERVED, 92 RESERVED, 93 RESERVED, 94 RESERVED, 95 RESERVED, 96 RESERVED, 97 RESERVED, 98 RESERVED, 99 RESERVED, 100 RESERVED, 101 RESERVED, 102 RESERVED, 103 RESERVED, 104 RESERVED
part E pins: 1 GND, 7 GND, 13 GND, 15 GND, 20 GND, 25 GND, 30 GND, 34 GND, 36 GND, 38 GND, 39 GND, 40 GND, 41 GND, 43 GND, 46 GND, 51 GND, 55 GND, 60 GND, 66 GND, 71 GND, 76 GND, 105 GND, 106 GND, 107 GND, 108 GND, 109 GND, 110 GND, 111 GND, 112 GND, 113 GND
part A text: nRF9151

## NRF52832-QFAA-R
designator U?
IC RF TXRX+MCU BLE 48QFN; Manufacturer: Nordic Semiconductor; Manufacturer Part Number: NRF52832-QFAA-R; Supplier: Arrow Electronics; LCSC Part Number: C77540; RoHS: Yes; Item Type: IC; Stock: 141000; Pricing: 3000=2.746 (USD); ComponentLink1URL: http://www.mouser.com/ds/2/297/nRF52832%20Product%20Brief%20v1.2-890472.pdf?src-supplier=Mouser; ComponentLink1Description: http://www.mouser.com/ds/2/297/nRF52832%20Product%20Brief%20v1.2-890472.pdf?src-supplier=Mouser; ComponentLink2URL: http://infocenter.nordicsemi.com/pdf/nRF52832_PB_v1.7.pdf?src-supplier=Digikey; ComponentLink2Description: http://infocenter.nordicsemi.com/pdf/nRF52832_PB_v1.7.pdf?src-supplier=Digikey; ComponentLink3URL: http://infocenter.nordicsemi.com/pdf/nRF52832_PS_v1.4.pdf?src-supplier=Digikey; ComponentLink3Description: http://infocenter.nordicsemi.com/pdf/nRF52832_PS_v1.4.pdf?src-supplier=Digikey; ComponentLink4URL: https://datasheet.octopart.com/NRF52832-QFAA-R-Nordic-Semiconductor-datasheet-104421228.pdf?src-supplier=LKR; ComponentLink4Description: https://datasheet.octopart.com/NRF52832-QFAA-R-Nordic-Semiconductor-datasheet-104421228.pdf?src-supplier=LKR
footprint QFN-48-EP(6x6)
pins: 1 DEC1, 2 P0.00/XL1, 3 P0.01/XL2, 4 P0.02/AIN0, 5 P0.03/AIN1, 6 P0.04/AIN2, 7 P0.05/AIN3, 8 P0.06, 9 P0.07, 10 P0.08, 11 P0.09/NFC1, 12 P0.10/NFC2, 13 VDD, 14 P0.11, 15 P0.12, 16 P0.13, 17 P0.14/TRACE3, 18 P0.15/TRACE2, 19 P0.16/TRACE1, 20 P0.17, 21 P0.18/TRACEDATA[0]/SWO, 22 P0.19, 23 P0.20/TRACECLK, 24 P0.21/RESET, 25 SWDCLK, 26 SWDIO, 27 P0.22, 28 P0.23, 29 P0.24, 30 ANT, 31 VSS, 32 DEC2, 33 DEC3, 34 XC1, 35 XC2, 36 VDD, 37 P0.25, 38 P0.26, 39 P0.27, 40 P0.28/AIN4, 41 P0.29/AIN5, 42 P0.30/AIN6, 43 P0.31/AIN7, 44 NC, 45 VSS, 46 DEC4, 47 DCC, 48 VDD, 49 EP

## NRF52840-QIAA-R
designator U?
IC RF TXRX+MCU 802.15.4 73QFN; Manufacturer: Nordic Semiconductor; Manufacturer Part Number: NRF52840-QIAA-R; Clock Frequency: 2.4GHz; Max Supply Voltage: 5.5V; Min Supply Voltage: 1.7V; Supplier: Avnet; LCSC Part Number: C190794; RoHS: No; Item Type: IC; Stock: 42000; Pricing: 3000=3.3173, 6000=3.30038, 12000=3.28345, 18000=3.26653, 24000=3.2496 (USD); Height: 850um; ComponentLink1URL: https://datasheet.ciiva.com/67714/nrf52840-ps-v1-1-67714656.pdf?src-supplier=Digikey; ComponentLink1Description: https://datasheet.ciiva.com/67714/nrf52840-ps-v1-1-67714656.pdf?src-supplier=Digikey
footprint AQFN-73-EP(7x7)
pins: 74 GND, A8 P0.31/AIN7, A10 P0.29/AIN5, A12 P0.02/AIN0, A14 P1.15, A16 P1.13, A18 DEC2, A20 P1.10, A22 VDD, A23 XC2, AA24 SWDCLK, AB2 DCCH, AC5 DECUSB, AC9 P0.14, AC11 P0.16, AC13 P0.18/RESET, AC15 P0.19, AC17 P0.21, AC19 P0.23, AC21 P0.25, AC24 SWDIO, AD2 VBUS, AD4 D-, AD6 D+, AD8 P0.13, AD10 P0.15, AD12 P0.17, AD14 VDD, AD16 P0.20, AD18 P0.22, AD20 P0.24, AD22 P1.00, AD23 VDD, B1 VDD, B3 DCC, B5 DEC4, B7 VSS, B9 P0.30/AIN6, B11 P0.28/AIN4, B13 P0.03/AIN1, B15 P1.14, B17 P1.12, B19 P1.11, B24 XC1, C1 DEC1, D2 P0.00/XL1, D23 DEC3, E24 DEC6, F2 P0.01/XL2, F23 VSS_PA, G1 P0.26, H2 P0.27, H23 ANT, J1 P0.04/AIN2, J24 P0.10/NFC2, K2 P0.05/AIN3, L1 P0.06, L24 P0.09/NFC1, M2 P0.07, N1 P0.08, N24 DEC5, P2 P1.08, P23 P1.07, R1 P1.09, R24 P1.06, T2 P0.11, T23 P1.05, U1 P0.12, U24 P1.04, V23 P1.03, W1 VDD, W24 P1.02, Y2 VDDH, Y23 P1.01
text: nRF52840

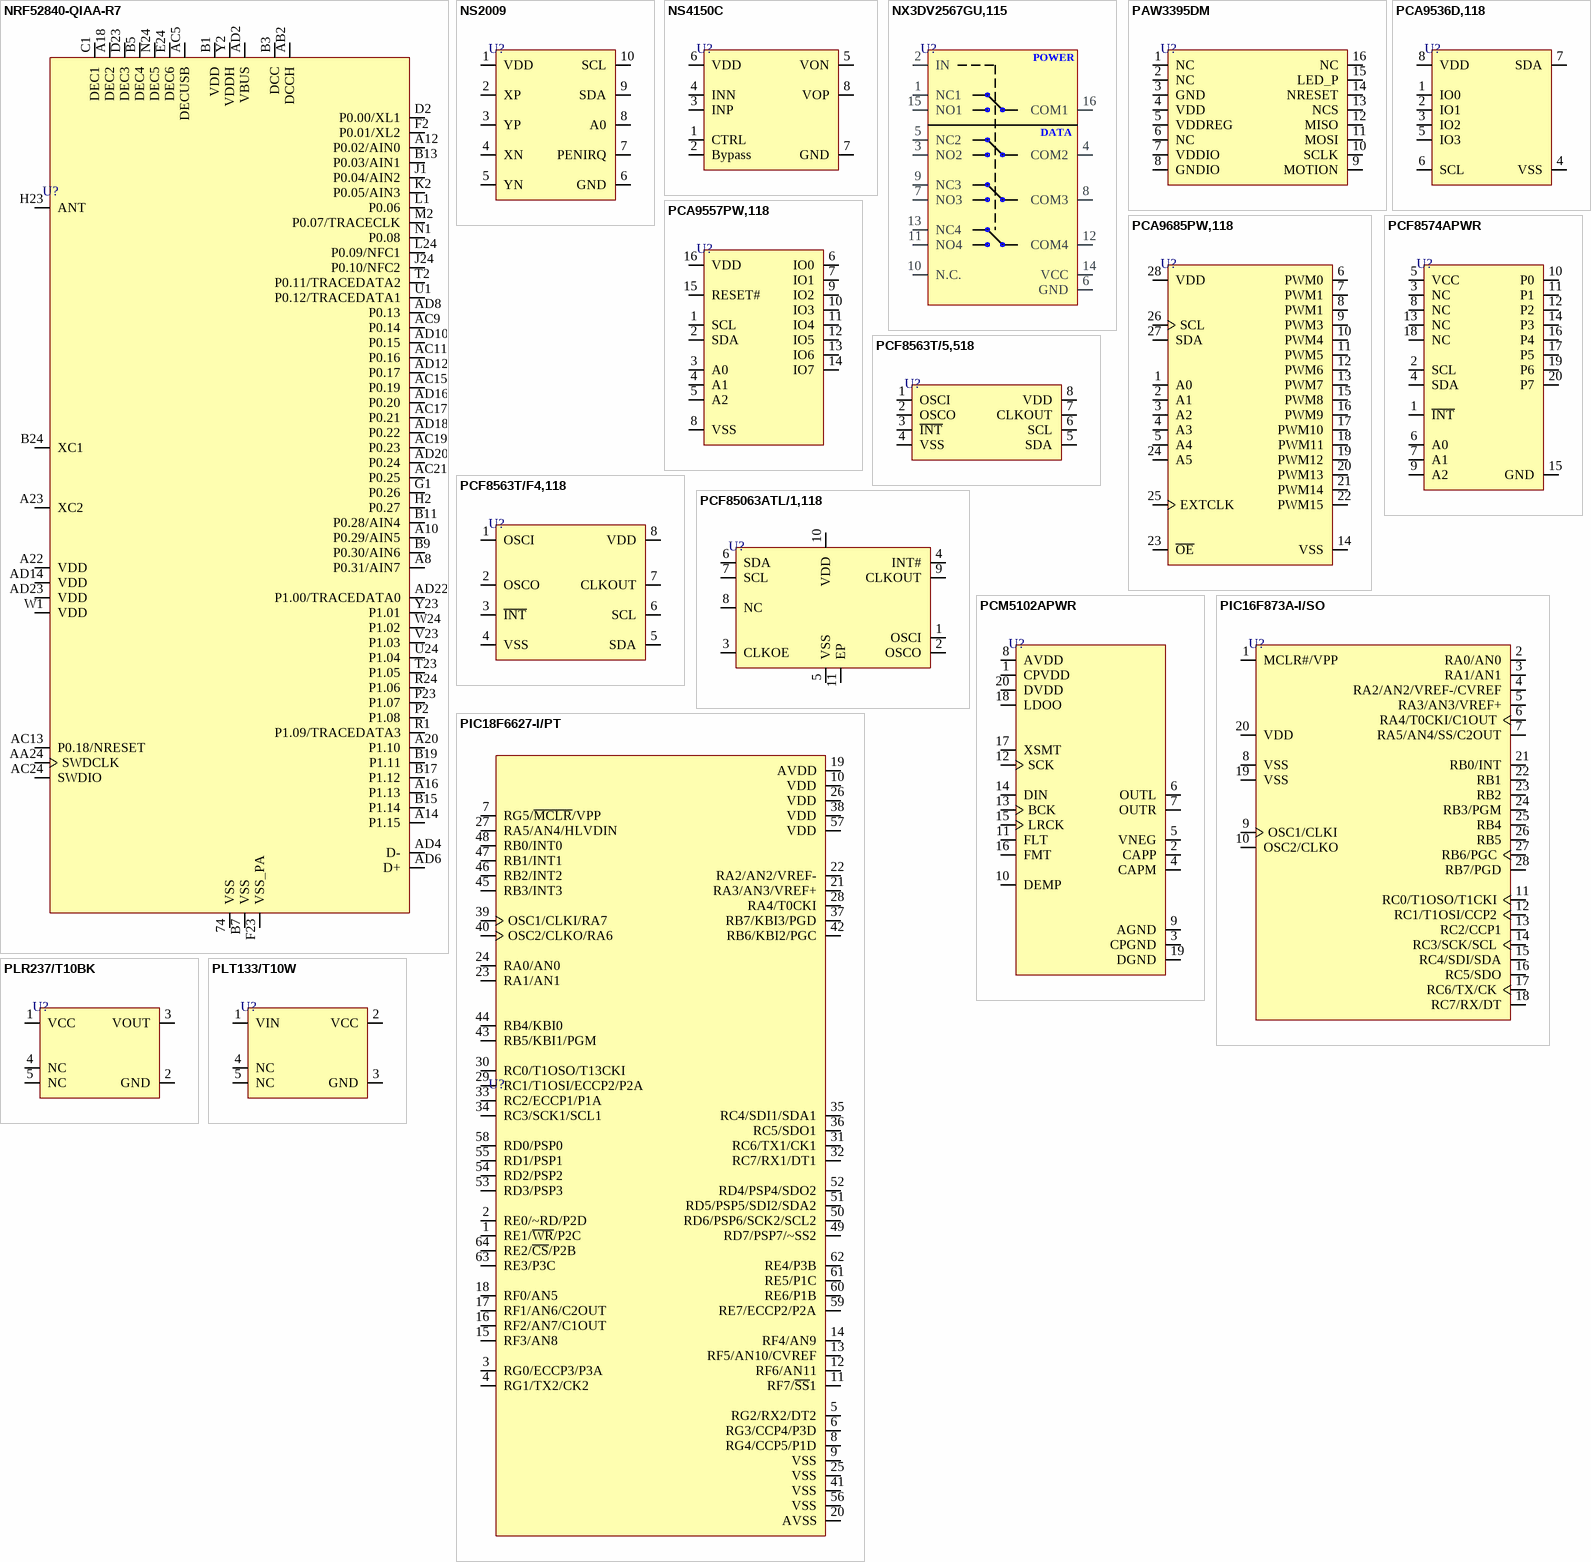
[diagram p14: symbols NRF52840-QIAA-R7 to PLT133/T10W]

## NRF52840-QIAA-R7
designator U?
IC RF TXRX+MCU 802.15.4 73QFN; Manufacturer: Nordic Semiconductor; Manufacturer Part Number: NRF52840-QIAA-R7; Interface: SPI,USB,ADC,PWM,UART; Frequency: 2.4GHz; Data Rate: 2Mbps; Sensitivity: -103dBm; Memory Size: 256KB; Current - Receiving: 5.2mA; Current - Transmitting: 14.8mA; Number of GPIO: 48; Supplier: Digikey; LCSC Part Number: C190794; RoHS: Yes; Item Type: IC; Stock: 9952; Pricing: 1=5.48 (USD); Mounting Technology: Surface Mount; Case/Package: QFN; Series: -; ComponentLink1URL: https://www.nordicsemi.com/-/media/DocLib/Other/Product_Spec/nRF52840PSv11pdf.pdf?src-supplier=Digikey; ComponentLink1Description: https://www.nordicsemi.com/-/media/DocLib/Other/Product_Spec/nRF52840PSv11pdf.pdf?src-supplier=Digikey
footprint 73-QFN (7x7)
pins: 74 VSS, A8 P0.31/AIN7, A10 P0.29/AIN5, A12 P0.02/AIN0, A14 P1.15, A16 P1.13, A18 DEC2, A20 P1.10, A22 VDD, A23 XC2, AA24 SWDCLK, AB2 DCCH, AC5 DECUSB, AC9 P0.14, AC11 P0.16, AC13 P0.18/NRESET, AC15 P0.19, AC17 P0.21, AC19 P0.23, AC21 P0.25, AC24 SWDIO, AD2 VBUS, AD4 D-, AD6 D+, AD8 P0.13, AD10 P0.15, AD12 P0.17, AD14 VDD, AD16 P0.20, AD18 P0.22, AD20 P0.24, AD22 P1.00/TRACEDATA0, AD23 VDD, B1 VDD, B3 DCC, B5 DEC4, B7 VSS, B9 P0.30/AIN6, B11 P0.28/AIN4, B13 P0.03/AIN1, B15 P1.14, B17 P1.12, B19 P1.11, B24 XC1, C1 DEC1, D2 P0.00/XL1, D23 DEC3, E24 DEC6, F2 P0.01/XL2, F23 VSS_PA, G1 P0.26, H2 P0.27, H23 ANT, J1 P0.04/AIN2, J24 P0.10/NFC2, K2 P0.05/AIN3, L1 P0.06, L24 P0.09/NFC1, M2 P0.07/TRACECLK, N1 P0.08, N24 DEC5, P2 P1.08, P23 P1.07, R1 P1.09/TRACEDATA3, R24 P1.06, T2 P0.11/TRACEDATA2, T23 P1.05, U1 P0.12/TRACEDATA1, U24 P1.04, V23 P1.03, W1 VDD, W24 P1.02, Y2 VDDH, Y23 P1.01

## NS2009
designator U?
MSOP-10 Touch Screen Controllers ROHS; Manufacturer: Shenzhen Nsiway Tech; Manufacturer Part Number: NS2009; Item Type: IC; Package: MSOP-10; LCSC Part Number: C219024; ComponentLink1Description: LCSC; ComponentLink1URL: https://www.lcsc.com/product-detail/Touch-Screen-Controllers_Shenzhen-Nsiway-Tech-NS2009_C219024.html?s_z=n_NS2009
footprint 10-MSOP
pins: 1 VDD, 2 XP, 3 YP, 4 XN, 5 YN, 6 GND, 7 PENIRQ, 8 A0, 9 SDA, 10 SCL

## NS4150C
designator U?
SOP-8 Audio Power OpAmps ROHS; Manufacturer: Shenzhen Nsiway Tech; Manufacturer Part Number: NS4150C; Item Type: IC; Package: SOP-8; LCSC Part Number: C2875838; ComponentLink1Description: LCSC; ComponentLink1URL: https://www.lcsc.com/product-detail/Audio-Power-OpAmps_Shenzhen-Nsiway-Tech-NS4150C_C2875838.html
footprint SOP-8
pins: 1 CTRL, 2 Bypass, 3 INP, 4 INN, 5 VON, 6 VDD, 7 GND, 8 VOP

## NX3DV2567GU,115
designator U?
IC ANLG SWITCH 4PDT 16XQFN; Manufacturer: NXP Semiconductors; Manufacturer Part Number: NX3DV2567GU,115; Supplier: Arrow Electronics; Supplier Part Number: NX3DV2567GU,115; RoHS: Yes; Item Type: IC; Stock: 3366; Pricing: 1=0.6382, 10=0.6036, 25=0.5976, 100=0.5198, 250=0.5147, 500=0.4508, 1000=0.4193, 3000=0.3615 (USD); ComponentLink1URL: https://datasheet.ciiva.com/1667/nx3dv2567-1667296.pdf?src-supplier=Digikey; ComponentLink1Description: https://datasheet.ciiva.com/1667/nx3dv2567-1667296.pdf?src-supplier=Digikey; ComponentLink2URL: https://datasheet.ciiva.com/4917/nx3dv2567-42536-4917579.pdf?src-supplier=Mouser; ComponentLink2Description: https://datasheet.ciiva.com/4917/nx3dv2567-42536-4917579.pdf?src-supplier=Mouser; ComponentLink3URL: https://datasheet.ciiva.com/1667/nx3dv2567-1667294.pdf?src-supplier=Digikey; ComponentLink3Description: https://datasheet.ciiva.com/1667/nx3dv2567-1667294.pdf?src-supplier=Digikey; ComponentLink4URL: https://datasheet.ciiva.com/1667/nx3dv2567-1667295.pdf?src-supplier=Digikey; ComponentLink4Description: https://datasheet.ciiva.com/1667/nx3dv2567-1667295.pdf?src-supplier=Digikey; ComponentLink5URL: https://datasheet.ciiva.com/6638/nx3dv2567-6638700.pdf?src-supplier=Digikey; ComponentLink5Description: https://datasheet.ciiva.com/6638/nx3dv2567-6638700.pdf?src-supplier=Digikey
footprint 16-XQFN (1.8x2.6)
pins: 1 NC1, 2 IN, 3 NO2, 4 COM2, 5 NC2, 6 GND, 7 NO3, 8 COM3, 9 NC3, 10 N.C., 11 NO4, 12 COM4, 13 NC4, 14 VCC, 15 NO1, 16 COM1
text: POWER; DATA

## PAW3395DM
designator U?
Mouse Sensor Optical Gaming Navigation Chip DIP-16; Manufacturer: PixArt Imaging Inc; Manufacturer Part Number: PAW3395DM; Item Type: IC; Package: PDIP-16
footprint PAW3395DM
pins: 1 NC, 2 NC, 3 GND, 4 VDD, 5 VDDREG, 6 NC, 7 VDDIO, 8 GNDIO, 9 MOTION, 10 SCLK, 11 MOSI, 12 MISO, 13 NCS, 14 NRESET, 15 LED_P, 16 NC

## PCA9536D,118
designator U?
400kHz SO-8 I/O Expanders ROHS; Manufacturer: NXP Semiconductors; Manufacturer Part Number: PCA9536D,118; Number of I/Os: 4; Interface: I2C,SMBus,Serial; Output Current: 50mA; Operating Supply Voltage: 5.5V; Operating Supply Current: 85mA; Max Power Dissipation: 200mW; Item Type: IC; Supplier: Avnet; Supplier Part Number: PCA9536D,118; RoHS: Yes; Category: Interface ICs; Stock: 96987; Pricing: 494=0.72487, 500=0.70966, 990=0.68938, 2500=0.67925, 5000=0.66404, 25000=0.64883, 50000=0.62856 (USD); Mounting Technology: Surface Mount; Case/Package: SO; Pins: 8; Weight: 0.01787oz; Min Operating Temperature: -40°C; Max Operating Temperature: 85°C; Packaging: Tape and Reel; Package Quantity: 1; Clock Frequency: 400kHz; Frequency: 400kHz; Series: -; Nominal Supply Voltage: 5.5V; Supply Current: 85mA; Lead Free: Lead Free; RoHS Compliant: Yes; ComponentLink1URL: https://datasheet.ciiva.com/8125/pca9536-8125671.pdf?src-supplier=Avnet; ComponentLink1Description: https://datasheet.ciiva.com/8125/pca9536-8125671.pdf?src-supplier=Avnet; ComponentLink2URL: https://datasheet.ciiva.com/1779/pca9536-1779979.pdf?src-supplier=Digi-Key; ComponentLink2Description: https://datasheet.ciiva.com/1779/pca9536-1779979.pdf?src-supplier=Digi-Key; ComponentLink3URL: https://datasheet.ciiva.com/1779/pca9536-1779980.pdf?src-supplier=Digi-Key; ComponentLink3Description: https://datasheet.ciiva.com/1779/pca9536-1779980.pdf?src-supplier=Digi-Key; ComponentLink4URL: https://datasheet.ciiva.com/1779/pca9536-1779981.pdf?src-supplier=Digi-Key; ComponentLink4Description: https://datasheet.ciiva.com/1779/pca9536-1779981.pdf?src-supplier=Digi-Key; ComponentLink5URL: https://datasheet.ciiva.com/3148/pca9536-3148502.pdf?src-supplier=Avnet; ComponentLink5Description: https://datasheet.ciiva.com/3148/pca9536-3148502.pdf?src-supplier=Avnet; ComponentLink6URL: https://datasheet.ciiva.com/3149/pca9536-3149304.pdf?src-supplier=Avnet; ComponentLink6Description: https://datasheet.ciiva.com/3149/pca9536-3149304.pdf?src-supplier=Avnet; ComponentLink7URL: https://datasheet.ciiva.com/16291/pca9536-16291035.pdf?src-supplier=Future+Electronics; ComponentLink7Description: https://datasheet.ciiva.com/16291/pca9536-16291035.pdf?src-supplier=Future+Electronics; LCSC Part Number: C2688883
footprint SOP-8
pins: 1 IO0, 2 IO1, 3 IO2, 4 VSS, 5 IO3, 6 SCL, 7 SDA, 8 VDD

## PCA9557PW,118
designator U?
IC XPND 400KHZ I2C SMBUS 16TSSOP; Manufacturer: NXP Semiconductors; Manufacturer Part Number: PCA9557PW,118; Interface: I2C,SMBus,Serial; Min Supply Voltage: 2.3V; Max Supply Voltage: 5.5V; Output Current: 50mA; Number of I/Os: 8; Max Power Dissipation: 200mW; Supply Current: 85mA; Supplier: Arrow Electronics; LCSC Part Number: C141380; RoHS: Yes; Item Type: IC; Stock: 2962; Pricing: 1=1.5161, 10=1.0131, 25=1.0025, 100=0.8766, 250=0.812, 500=0.7757, 1000=0.7025 (USD); Mounting Technology: Surface Mount; Case/Package: TSSOP; Pins: 16; Weight: 0.006102oz; Min Operating Temperature: -40°C; Max Operating Temperature: 85°C; Packaging: Tape and Reel; Package Quantity: 1; Frequency: 400kHz; Clock Frequency: 400kHz; Series: -; Nominal Supply Voltage: 5.5V; Radiation Hardening: No; Lead Free: Lead Free; RoHS Compliant: Yes; ComponentLink1URL: https://datasheet.ciiva.com/46390/1786003-46390826.pdf?src-supplier=Element14; ComponentLink1Description: https://datasheet.ciiva.com/46390/1786003-46390826.pdf?src-supplier=Element14; ComponentLink2URL: https://datasheet.ciiva.com/1779/pca9557-1779992.pdf?src-supplier=Digikey; ComponentLink2Description: https://datasheet.ciiva.com/1779/pca9557-1779992.pdf?src-supplier=Digikey; ComponentLink3URL: https://datasheet.ciiva.com/1779/pca9557-1779991.pdf?src-supplier=Digikey; ComponentLink3Description: https://datasheet.ciiva.com/1779/pca9557-1779991.pdf?src-supplier=Digikey; ComponentLink4URL: https://datasheet.ciiva.com/1779/pca9557-1779993.pdf?src-supplier=Digikey; ComponentLink4Description: https://datasheet.ciiva.com/1779/pca9557-1779993.pdf?src-supplier=Digikey; ComponentLink5URL: https://datasheet.ciiva.com/8123/pca9557-8123482.pdf?src-supplier=Avnet; ComponentLink5Description: https://datasheet.ciiva.com/8123/pca9557-8123482.pdf?src-supplier=Avnet; ComponentLink6URL: https://datasheet.ciiva.com/16219/pca9557-16219951.pdf?src-supplier=Future+Electronics; ComponentLink6Description: https://datasheet.ciiva.com/16219/pca9557-16219951.pdf?src-supplier=Future+Electronics; ComponentLink7URL: https://datasheet.ciiva.com/8125/pca9557-8125431.pdf?src-supplier=Avnet; ComponentLink7Description: https://datasheet.ciiva.com/8125/pca9557-8125431.pdf?src-supplier=Avnet
footprint TSSOP_16
pins: 1 SCL, 2 SDA, 3 A0, 4 A1, 5 A2, 6 IO0, 7 IO1, 8 VSS, 9 IO2, 10 IO3, 11 IO4, 12 IO5, 13 IO6, 14 IO7, 15 RESET#, 16 VDD

## PCA9685PW,118
designator U?
IC LED DRIVER RGBA 28-TSSOP; Manufacturer: NXP Semiconductors; Manufacturer Part Number: PCA9685PW,118; Number of Outputs: 16; Frequency: 1MHz; Max Supply Voltage: 5.5V; Min Supply Voltage: 2.3V; Output Current per Channel: 25mA; High Level Output Current: 10mA; Low Level Output Current: 400A; Power Dissipation: 400W; Dimming: PWM; Supply Current: 10A; Supplier: Arrow Electronics; LCSC Part Number: C2678753; RoHS: Yes; Item Type: IC; Stock: 1875; Pricing: 1=3.205, 10=2.296, 25=2.244, 100=1.892, 250=1.704, 500=1.535, 1000=1.417 (USD); Mounting Technology: Surface Mount; Case/Package: TSSOP; Pins: 28; Min Operating Temperature: -40°C; Max Operating Temperature: 85°C; Packaging: Tape and Reel; Package Quantity: 2500; Output Voltage: 5.5V; Series: -; Radiation Hardening: No; Lead Free: Lead Free; RoHS Compliant: Yes; ComponentLink1URL: https://datasheet.ciiva.com/15134/getdatasheetpartid-103066-15134201.pdf?src-supplier=Verical; ComponentLink1Description: https://datasheet.ciiva.com/15134/getdatasheetpartid-103066-15134201.pdf?src-supplier=Verical; ComponentLink2URL: https://datasheet.ciiva.com/8125/pca9685-8125357.pdf?src-supplier=Avnet; ComponentLink2Description: https://datasheet.ciiva.com/8125/pca9685-8125357.pdf?src-supplier=Avnet; ComponentLink3URL: https://datasheet.ciiva.com/1947/pca9685-1947062.pdf?src-supplier=Digikey; ComponentLink3Description: https://datasheet.ciiva.com/1947/pca9685-1947062.pdf?src-supplier=Digikey
footprint TSSOP-28
pins: 1 A0, 2 A1, 3 A2, 4 A3, 5 A4, 6 PWM0, 7 PWM1, 8 PWM1, 9 PWM3, 10 PWM4, 11 PWM5, 12 PWM6, 13 PWM7, 14 VSS, 15 PWM8, 16 PWM9, 17 PWM10, 18 PWM11, 19 PWM12, 20 PWM13, 21 PWM14, 22 PWM15, 23 ~{OE}, 24 A5, 25 EXTCLK, 26 SCL, 27 SDA, 28 VDD

## PCF8563T/5,518
designator U?
IC RTC CLOCK/CALENDAR I2C 8SO; Manufacturer: NXP Semiconductors; Manufacturer Part Number: PCF8563T/5,518; Supplier: Arrow Electronics; LCSC Part Number: C7440; RoHS: Yes; Item Type: IC; Stock: 812; Pricing: 1=0.8372, 10=0.6546, 100=0.5322, 500=0.5102, 1000=0.4872, 2500=0.4562, 5000=0.4356, 10000=0.4016, 25000=0.3863 (USD); ComponentLink1URL: https://datasheet.ciiva.com/8145/pcf8563-8145180.pdf?src-supplier=Avnet; ComponentLink1Description: https://datasheet.ciiva.com/8145/pcf8563-8145180.pdf?src-supplier=Avnet; ComponentLink2URL: https://datasheet.ciiva.com/1238/pcf8563-1238727.pdf?src-supplier=Digikey; ComponentLink2Description: https://datasheet.ciiva.com/1238/pcf8563-1238727.pdf?src-supplier=Digikey; ComponentLink3URL: https://datasheet.ciiva.com/1238/pcf8563-1238728.pdf?src-supplier=Digikey; ComponentLink3Description: https://datasheet.ciiva.com/1238/pcf8563-1238728.pdf?src-supplier=Digikey; ComponentLink4URL: https://datasheet.ciiva.com/1238/pcf8563-1238773.pdf?src-supplier=Digikey; ComponentLink4Description: https://datasheet.ciiva.com/1238/pcf8563-1238773.pdf?src-supplier=Digikey; ComponentLink5URL: https://datasheet.ciiva.com/16287/pcf8563-16287110.pdf?src-supplier=Future+Electronics; ComponentLink5Description: https://datasheet.ciiva.com/16287/pcf8563-16287110.pdf?src-supplier=Future+Electronics
footprint SOIC-8(0.154", 3.90mm Width)
pins: 1 OSCI, 2 OSCO, 3 ~{INT}, 4 VSS, 5 SDA, 6 SCL, 7 CLKOUT, 8 VDD

## PCF8563T/F4,118
designator U?
IC RTC CLOCK/CALENDAR I2C 8SO; Manufacturer: NXP Semiconductors; Manufacturer Part Number: PCF8563T/F4,118; Max Supply Voltage: 5.5V; Min Supply Voltage: 1.8V; Logic Function: Clock; Time Format: HH:MM:SS; Supplier: Future Electronics; LCSC Part Number: C80798; RoHS: Yes; Item Type: IC; Stock: 77500; Pricing: 2500=0.71 (USD); Mounting Technology: Surface Mount; Case/Package: SO; Pins: 8; Weight: 0.019048oz; Min Operating Temperature: -40°C; Max Operating Temperature: 85°C; Packaging: Tape and Reel; Interface: I2C; Nominal Supply Voltage: 5.5V; Radiation Hardening: No; Lead Free: Lead Free; Temperature Grade: INDUSTRIAL; RoHS Compliant: Yes; ComponentLink1URL: https://datasheet.ciiva.com/6668/pcf8563-6668170.pdf?src-supplier=Digikey; ComponentLink1Description: https://datasheet.ciiva.com/6668/pcf8563-6668170.pdf?src-supplier=Digikey; ComponentLink2URL: https://datasheet.ciiva.com/6668/pcf8563-6668166.pdf?src-supplier=Digikey; ComponentLink2Description: https://datasheet.ciiva.com/6668/pcf8563-6668166.pdf?src-supplier=Digikey; ComponentLink3URL: https://datasheet.ciiva.com/6668/pcf8563-6668174.pdf?src-supplier=Digikey; ComponentLink3Description: https://datasheet.ciiva.com/6668/pcf8563-6668174.pdf?src-supplier=Digikey; ComponentLink4URL: https://datasheet.ciiva.com/4771/pcf8563-4771994.pdf?src-supplier=Mouser; ComponentLink4Description: https://datasheet.ciiva.com/4771/pcf8563-4771994.pdf?src-supplier=Mouser; ComponentLink5URL: https://datasheet.ciiva.com/15225/getdatasheetpartid-633364-15225014.pdf?src-supplier=Verical; ComponentLink5Description: https://datasheet.ciiva.com/15225/getdatasheetpartid-633364-15225014.pdf?src-supplier=Verical; ComponentLink6URL: https://datasheet.ciiva.com/8144/pcf8563-8144541.pdf?src-supplier=Avnet; ComponentLink6Description: https://datasheet.ciiva.com/8144/pcf8563-8144541.pdf?src-supplier=Avnet
footprint SOIC-8(0.154", 3.90mm Width)
pins: 1 OSCI, 2 OSCO, 3 ~{INT}, 4 VSS, 5 SDA, 6 SCL, 7 CLKOUT, 8 VDD

## PCF8574APWR
designator U?
8-bit I2C IO Expander 20TSSOP; Manufacturer: Texas Instruments; Manufacturer Part Number: PCF8574APWR; Item Type: IC; Supplier: Mouser; Supplier Part Number: 595-PCF8574APWR; RoHS: Yes; Category: Interface ICs; Stock: 4215; Pricing: 1=1.54, 10=1.38, 50=1.38, 100=1.07, 1000=0.78, 10000=0.707 (USD); Length: 6.5mm; Width: 4.4mm; Thickness: 1mm; ComponentLink1URL: https://datasheet.ciiva.com/23785/1534147-23785504.pdf?src-supplier=Newark; ComponentLink1Description: https://datasheet.ciiva.com/23785/1534147-23785504.pdf?src-supplier=Newark; ComponentLink2URL: https://datasheet.ciiva.com/15134/getdatasheetpartid-253002-15134574.pdf?src-supplier=Verical; ComponentLink2Description: https://datasheet.ciiva.com/15134/getdatasheetpartid-253002-15134574.pdf?src-supplier=Verical; ComponentLink3URL: https://datasheet.ciiva.com/3149/pcf8574a-3149721.pdf?src-supplier=Avnet; ComponentLink3Description: https://datasheet.ciiva.com/3149/pcf8574a-3149721.pdf?src-supplier=Avnet; ComponentLink4URL: https://datasheet.ciiva.com/3149/pcf8574a-3149799.pdf?src-supplier=Avnet; ComponentLink4Description: https://datasheet.ciiva.com/3149/pcf8574a-3149799.pdf?src-supplier=Avnet; ComponentLink5URL: https://datasheet.ciiva.com/7747/1768199-7747660.pdf?src-supplier=Element14; ComponentLink5Description: https://datasheet.ciiva.com/7747/1768199-7747660.pdf?src-supplier=Element14; ComponentLink6URL: https://datasheet.ciiva.com/1780/pcf8574a-1780187.pdf?src-supplier=Digi-Key; ComponentLink6Description: https://datasheet.ciiva.com/1780/pcf8574a-1780187.pdf?src-supplier=Digi-Key; ComponentLink7URL: https://datasheet.ciiva.com/1780/pcf8574a-1780188.pdf?src-supplier=Digi-Key; ComponentLink7Description: https://datasheet.ciiva.com/1780/pcf8574a-1780188.pdf?src-supplier=Digi-Key; ComponentLink8URL: https://datasheet.ciiva.com/1780/pcf8574a-1780189.pdf?src-supplier=Digi-Key; ComponentLink8Description: https://datasheet.ciiva.com/1780/pcf8574a-1780189.pdf?src-supplier=Digi-Key; LCSC Part Number: C94361
footprint TSSOP-20
pins: 1 ~{INT}, 2 SCL, 3 NC, 4 SDA, 5 VCC, 6 A0, 7 A1, 8 NC, 9 A2, 10 P0, 11 P1, 12 P2, 13 NC, 14 P3, 15 GND, 16 P4, 17 P5, 18 NC, 19 P6, 20 P7

## PCF85063ATL/1,118
designator U?
IC RTC CLK/CALENDAR I2C 10DFN; Manufacturer: NXP Semiconductors; Manufacturer Part Number: PCF85063ATL/1,118; Max Supply Voltage: 5.5V; Min Supply Voltage: 900mV; Logic Function: Clock; Date Format: Binary; Time Format: HH:MM:SS; Supplier: Digikey; LCSC Part Number: C404360; RoHS: Yes; Item Type: IC; Stock: 20592; Pricing: 1=1.55, 10=0.982, 25=0.8304, 100=0.6594, 250=0.57576, 500=0.5246, 1000=0.482 (USD); Mounting Technology: Surface Mount; Case/Package: DFN EP; Pins: 10; Min Operating Temperature: -40°C; Max Operating Temperature: 85°C; Packaging: Tape and Reel; Package Quantity: 4000; Interface: I2C; Radiation Hardening: No; Lead Free: Lead Free; RoHS Compliant: Yes; Reach SVHC Compliant: No
footprint 10-DFN (2.6x2.6)
pins: 1 OSCI, 2 OSCO, 3 CLKOE, 4 INT#, 5 VSS, 6 SDA, 7 SCL, 8 NC, 9 CLKOUT, 10 VDD, 11 EP

## PCM5102APWR
designator U?
IC DAC 16/24/32BIT 384K 20TSSOP; Manufacturer: Texas Instruments; Manufacturer Part Number: PCM5102APWR; Supplier: Mouser; LCSC Part Number: 595-PCM5102APWR; RoHS: Yes; Item Type: IC; Stock: 2139; Pricing: 1=4.43, 10=3.32, 50=3.07, 100=2.75, 1000=2.36, 10000=2.35 (USD); ComponentLink1URL: https://datasheet.ciiva.com/24021/slas859a-261040-24021907.pdf?src-supplier=Mouser; ComponentLink1Description: https://datasheet.ciiva.com/24021/slas859a-261040-24021907.pdf?src-supplier=Mouser; ComponentLink2URL: https://datasheet.ciiva.com/29648/pcm5102a-29648362.pdf?src-supplier=Digikey; ComponentLink2Description: https://datasheet.ciiva.com/29648/pcm5102a-29648362.pdf?src-supplier=Digikey; ComponentLink3URL: https://datasheet.ciiva.com/6673/pcm5102a-6673611.pdf?src-supplier=Digikey; ComponentLink3Description: https://datasheet.ciiva.com/6673/pcm5102a-6673611.pdf?src-supplier=Digikey
footprint TSSOP-20
pins: 1 CPVDD, 2 CAPP, 3 CPGND, 4 CAPM, 5 VNEG, 6 OUTL, 7 OUTR, 8 AVDD, 9 AGND, 10 DEMP, 11 FLT, 12 SCK, 13 BCK, 14 DIN, 15 LRCK, 16 FMT, 17 XSMT, 18 LDOO, 19 DGND, 20 DVDD

## PIC16F873A-I/SO
designator U?
IC MCU 8BIT 7KB FLASH 28SOIC; Manufacturer: Microchip Technology; Manufacturer Part Number: PIC16F873A-I/SO; Package: 28-SOIC; Item Type: IC; ComponentLink1Description: LCSC; ComponentLink1URL: https://www.digikey.com/en/products/detail/microchip-technology/PIC16F873A-I-SO/446135
footprint 28-SOIC
pins: 1 MCLR#/VPP, 2 RA0/AN0, 3 RA1/AN1, 4 RA2/AN2/VREF-/CVREF, 5 RA3/AN3/VREF+, 6 RA4/T0CKI/C1OUT, 7 RA5/AN4/SS/C2OUT, 8 VSS, 9 OSC1/CLKI, 10 OSC2/CLKO, 11 RC0/T1OSO/T1CKI, 12 RC1/T1OSI/CCP2, 13 RC2/CCP1, 14 RC3/SCK/SCL, 15 RC4/SDI/SDA, 16 RC5/SDO, 17 RC6/TX/CK, 18 RC7/RX/DT, 19 VSS, 20 VDD, 21 RB0/INT, 22 RB1, 23 RB2, 24 RB3/PGM, 25 RB4, 26 RB5, 27 RB6/PGC, 28 RB7/PGD